# Altium footprint library SAMTEC_HTSW-101-07-S-D.PcbLib: 1 footprints
Each footprint in its own frame and in the unit in brackets; x right, y up, seen from the top. Pads: shape width x height; smd on the part's side, far side on the other; paste and mask are expansions set on the pad; w line width, h text height; cw(c..) or ccw(c..) is an arc to the next point about the centre after c.
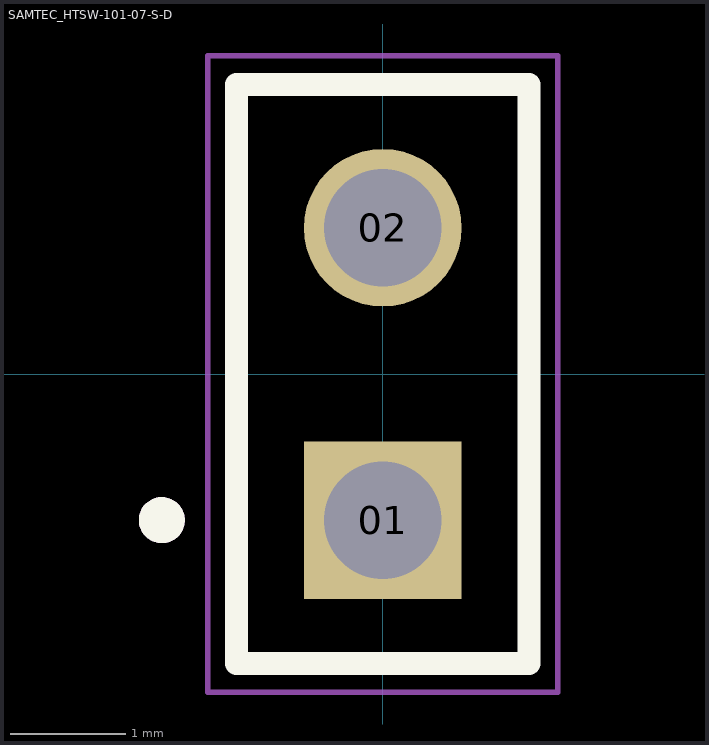
[diagram p0: the footprint, top view; thin cyan lines are the x and y axes]

## SAMTEC_HTSW-101-07-S-D [mm]
pads (2):
  rect 1.37x1.37 / inner round 1.37 / far side rect 1.37x1.37 hole 1.02: 01(0,-1.27)
  round 1.37 hole 1.02: 02(0,1.27)
Top Overlay:
  circle w0.2: c-1.92,-1.27 r0.1
  lines w0.2: -1.27,-2.515 -1.27,2.515 1.27,2.515 1.27,-2.515 -1.27,-2.515
Mechanical 13:
  circle w0.2: c-1.92,-1.27 r0.1
  lines w0.1: -1.27,-2.515 -1.27,2.515 1.27,2.515 1.27,-2.515 -1.27,-2.515
Mechanical 15:
  lines w0.05: -1.52,-2.765 -1.52,2.765 1.52,2.765 1.52,-2.765 -1.52,-2.765